# Altium schematic symbol library CL31A106KBHNNNE.SchLib: 1 symbol
Pins are listed as number, name and electrical type; pins without a type are passive.

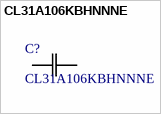
[diagram p0: symbol CL31A106KBHNNNE]

## CL31A106KBHNNNE
designator C?
Description; Manufacturer_Name: Samsung; Copyright: Copyright (C) 2025 Ultra Librarian. All rights reserved.; Manufacturer_Part_Number: CL31A106KBHNNNE
footprint CAP_CL31_SAM
pins: 1, 2